# Altium footprint library My_library.PcbLib: 1 footprints
Each footprint in its own frame and in the unit in brackets; x right, y up, seen from the top. Pads: shape width x height; smd on the part's side, far side on the other; paste and mask are expansions set on the pad; w line width, h text height; cw(c..) or ccw(c..) is an arc to the next point about the centre after c.
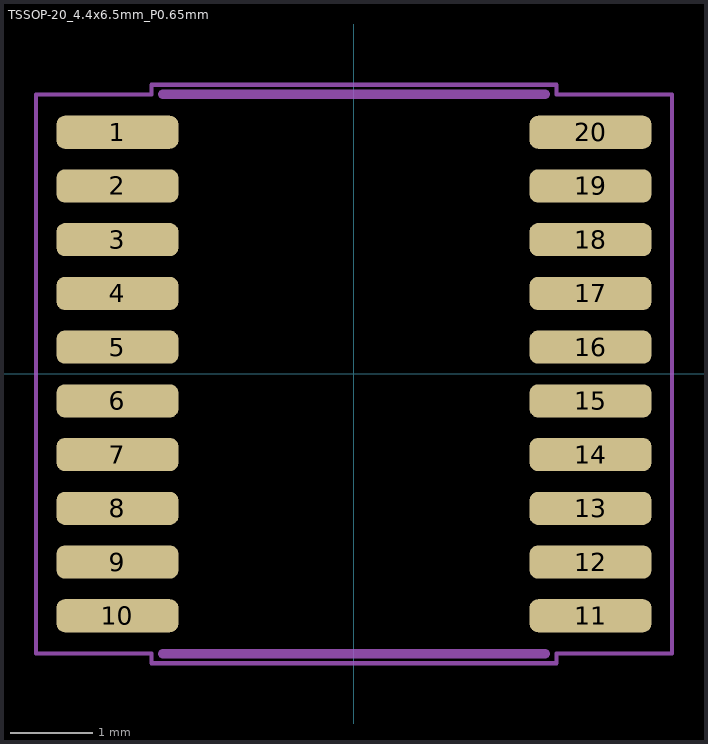
[diagram p0: the footprint, top view; thin cyan lines are the x and y axes]

## TSSOP-20_4.4x6.5mm_P0.65mm [mm]
pads (20):
  rrect0% 1.475x0.4 smd: 1(-2.863,2.925) 2(-2.863,2.275) 3(-2.863,1.625) 4(-2.863,0.975) 5(-2.863,0.325) 6(-2.863,-0.325) 7(-2.863,-0.975) 8(-2.863,-1.625) 9(-2.863,-2.275) 10(-2.863,-2.925) 11(2.863,-2.925) 12(2.863,-2.275) 13(2.863,-1.625) 14(2.863,-0.975) 15(2.863,-0.325) 16(2.863,0.325) 17(2.863,0.975) 18(2.863,1.625) 19(2.863,2.275) 20(2.863,2.925)
Mechanical 13:
  lines w0.12: -2.31,-3.385 2.31,-3.385 ; -2.31,3.385 2.31,3.385
Mechanical 15:
  lines w0.05: -3.85,-3.38 -3.85,3.38 -2.45,3.38 -2.45,3.5 2.45,3.5 2.45,3.38 3.85,3.38 3.85,-3.38 2.45,-3.38 2.45,-3.5 -2.45,-3.5 -2.45,-3.38 -3.85,-3.38
3D body "STC8H1K08-36I-TSSOP20.step": height 1.2, standoff 0, extent -3.854,-3.379 3.854,3.379